# EAGLE library part MCP6422-E_SN (library MCP6422-E_SN)
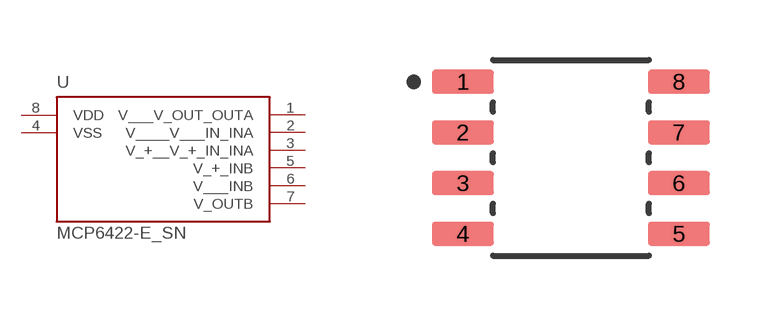
[diagram p0: symbol with the pads of C636325_SOIC-8; footprint C636325_SOIC-8]

Designator prefix U

## MCP6422-E_SN  [C636325_SOIC-8]
1  V___V_OUT_OUTA
2  V____V___IN_INA
3  V_+__V_+_IN_INA
4  VSS  pwr
5  V_+_INB
6  V___INB
7  V_OUTB
8  VDD  pwr

## Footprint C636325_SOIC-8 (pad centres in mm)
MCP6422-E/SN — Clean-Room IPC-7351B / JEDEC MS-012-AA
smd 1.55 x 0.6: 1 -2.7,1.905; 2 -2.7,0.635; 3 -2.7,-0.635; 4 -2.7,-1.905; 5 2.7,-1.905; 6 2.7,-0.635; 7 2.7,0.635; 8 2.7,1.905